# Altium footprint library HTSW-105-09-G-T.PcbLib: 1 footprints
Each footprint in its own frame and in the unit in brackets; x right, y up, seen from the top. Pads: shape width x height; smd on the part's side, far side on the other; paste and mask are expansions set on the pad; w line width, h text height; cw(c..) or ccw(c..) is an arc to the next point about the centre after c.
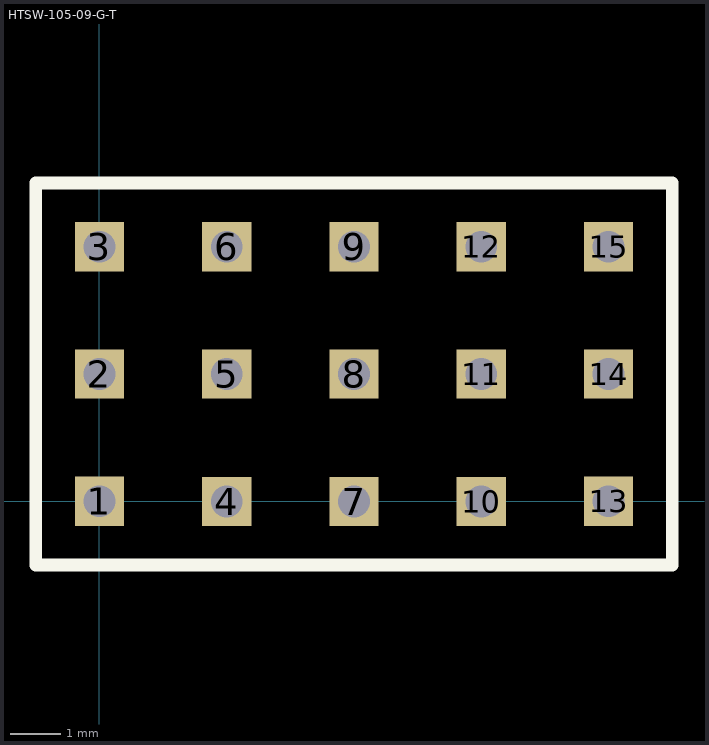
[diagram p0: the footprint, top view; thin cyan lines are the x and y axes]

## HTSW-105-09-G-T [mm]
pads (15):
  rect 0.985x0.985 / inner round 0.985 / far side rect 0.985x0.985 hole 0.635: 1(0,0) 2(0,2.54) 3(0,5.08) 4(2.54,-0.005) 5(2.54,2.54) 6(2.54,5.08) 7(5.08,-0.005) 8(5.08,2.54) 9(5.08,5.08) 10(7.62,-0.005) 11(7.62,2.54) 12(7.62,5.08) 13(10.16,0) 14(10.16,2.54) 15(10.16,5.08)
Top Overlay:
  lines w0.254: -1.27,-1.27 -1.27,6.35 11.43,6.35 11.43,-1.27 -1.27,-1.27
3D body "HTSW-105-09-G-T.stp": height 8.38, standoff -10.16, extent -1.27,-1.245 11.43,6.325